# Altium schematic symbol library SC8815.SchLib: 1 symbol
Pins are listed as number, name and electrical type; pins without a type are passive.

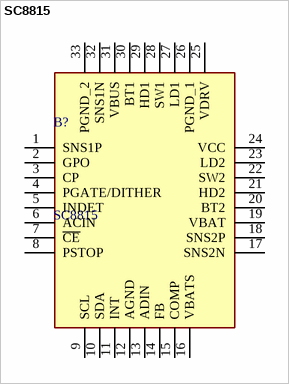
[diagram p0: symbol SC8815]

## SC8815
designator B?
SC8815 High Efficiency, Synchronous, Bi-Directional Buck-Boost Charger Controller with I2C Interface; Manufacturer_Name: Southchip; Geometry.Height: 0.8mm; Manufacturer_Part_Number: SC8815; Mouser Part Number: *; Mouser Price/Stock: *; Arrow Part Number: *; Arrow Price/Stock: *; Datasheet Link: https://datasheet.lcsc.com/lcsc/2006221513_Southchip-Semicon-SC8815QDER_C429908.pdf
footprint QFN40P400X400X80-33N-D
pins: 1 SNS1P, 2 GPO, 3 CP, 4 PGATE/DITHER, 5 INDET, 6 ACIN, 7 ~{CE}, 8 PSTOP, 9 SCL, 10 SDA, 11 INT, 12 AGND, 13 ADIN, 14 FB, 15 COMP, 16 VBATS, 17 SNS2N, 18 SNS2P, 19 VBAT, 20 BT2, 21 HD2, 22 SW2, 23 LD2, 24 VCC, 25 VDRV, 26 PGND_1, 27 LD1, 28 SW1, 29 HD1, 30 BT1, 31 VBUS, 32 SNS1N, 33 PGND_2